# Altium schematic symbol library TPS3851H33EDRBR.SchLib: 1 symbol
Pins are listed as number, name and electrical type; pins without a type are passive.

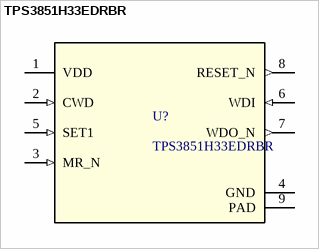
[diagram p0: symbol TPS3851H33EDRBR]

## TPS3851H33EDRBR
designator U?
High-accuracy voltage supervisor with Integrated watchdog timer 8-SON -40 to 125; Manufacturer_Name: Texas Instruments; TYPE: TYPE; RefDes: RefDes; Copyright: Copyright (C) 2026 Ultra Librarian. All rights reserved.; Manufacturer_Part_Number: TPS3851H33EDRBR; Datasheet: https://www.ti.com/lit/gpn/tps3851
footprint DRB0008A
pins: 1 VDD (power), 2 CWD (in), 3 MR_N (in), 4 GND (power), 5 SET1 (in), 6 WDI (in), 7 WDO_N (out), 8 RESET_N (out), 9 PAD (power)